# Altium footprint library Package_DFN_QFN.PcbLib: 735 footprints (part 2 of 46)
Each footprint in its own frame and in the unit in brackets; x right, y up, seen from the top. Pads: shape width x height; smd on the part's side, far side on the other; paste and mask are expansions set on the pad; w line width, h text height; cw(c..) or ccw(c..) is an arc to the next point about the centre after c.
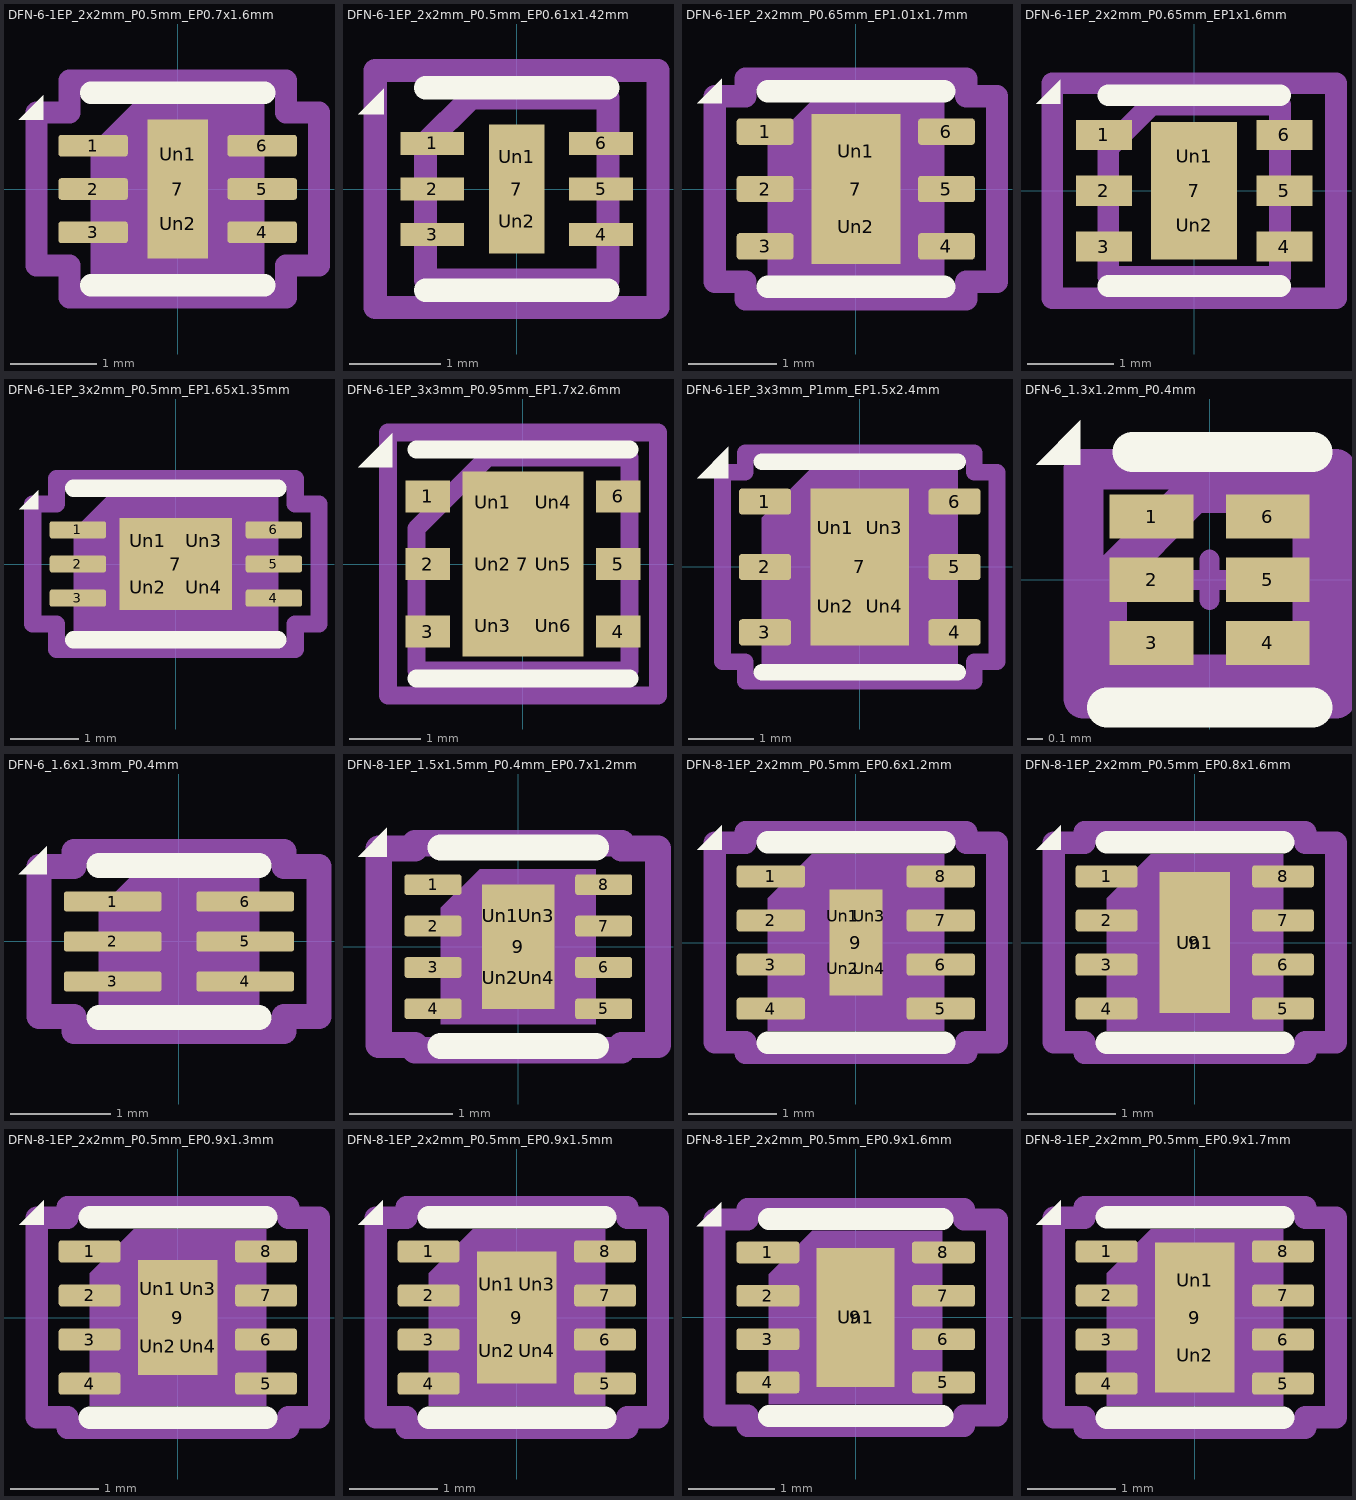
[diagram p1: the footprints below, top view; thin cyan lines are the x and y axes]

## DFN-6-1EP_2x2mm_P0.5mm_EP0.7x1.6mm [mm] "DFN-6-1EP_2x2mm_P0.5mm_EP0.7x1.6mm"
pads (9):
  rrect25% 0.8x0.25 smd: 1(-0.975,0.5) 2(-0.975,0) 3(-0.975,-0.5) 4(0.975,-0.5) 5(0.975,0) 6(0.975,0.5)
  rect 0.7x1.6 smd: 7(0,0)
  rrect25% 0.56x0.64 on Top Paste: Un1(0,0.4) Un2(0,-0.4)
F.SilkS:
  region: -1.55,0.8 -1.83,0.8 -1.55,1.08
  lines w0.254: -1,-1.11 1,-1.11 ; -1,1.11 1,1.11
Top Component Center:
  lines w0.127: -0.127,0 0.127,0 -0.127,0 ; 0,-0.127 0,0.127 0,-0.127
Top Assembly:
  region: 1,-1 -1,-1 -1,0.5 -0.5,1 1,1
Top Courtyard:
  lines w0.254: -1.63,-0.88 -1.63,0.88 -1.25,0.88 -1.25,1.25 1.25,1.25 1.25,0.88 1.63,0.88 1.63,-0.88 1.25,-0.88 1.25,-1.25 -1.25,-1.25 -1.25,-0.88 -1.63,-0.88
Top Designator:
  text ".Designator" at -2.251,-0.226 h1
3D body "DFN-6-1EP_2x2mm_P0.5mm_EP0.61x1.42mm.step": height 0.77, standoff 0, extent -1,-0.99 1,0.99

## DFN-6-1EP_2x2mm_P0.5mm_EP0.61x1.42mm [mm] "DFN-6-1EP_2x2mm_P0.5mm_EP0.61x1.42mm"
pads (9):
  rect 0.7x0.25 smd: 1(-0.925,0.5) 2(-0.925,0) 3(-0.925,-0.5) 4(0.925,-0.5) 5(0.925,0) 6(0.925,0.5)
  rect 0.61x1.42 smd: 7(0,0)
  rect 0.5x0.56 on Top Paste: Un1(0,0.355) Un2(0,-0.355)
F.SilkS:
  region: -1.46,0.82 -1.74,0.82 -1.46,1.1
  lines w0.254: -1,-1.11 1,-1.11 ; -1,1.11 1,1.11
Top Component Center:
  lines w0.127: -0.127,0 0.127,0 -0.127,0 ; 0,-0.127 0,0.127 0,-0.127
Top Assembly:
  lines w0.254: -1,-1 1,-1 1,1 -0.5,1 -1,0.5 -1,-1
Top Courtyard:
  lines w0.254: -1.55,-1.3 1.55,-1.3 1.55,1.3 -1.55,1.3 -1.55,-1.3
Top Designator:
  text ".Designator" at -2.251,-0.226 h1
3D body "DFN-6-1EP_2x2mm_P0.5mm_EP0.61x1.42mm.step": height 0.77, standoff 0, extent -1,-0.99 1,0.99

## DFN-6-1EP_2x2mm_P0.65mm_EP1.01x1.7mm [mm] "DFN-6-1EP_2x2mm_P0.65mm_EP1.01x1.7mm"
pads (9):
  rrect25% 0.645x0.3 smd: 1(-1.028,0.65) 2(-1.028,0) 3(-1.028,-0.65) 4(1.028,-0.65) 5(1.028,0) 6(1.028,0.65)
  rect 1.01x1.7 smd: 7(0,0)
  rrect25% 0.81x0.69 on Top Paste: Un1(0,0.425) Un2(0,-0.425)
F.SilkS:
  region: -1.52,0.97 -1.8,0.97 -1.52,1.25
  lines w0.254: -1,-1.11 1,-1.11 ; -1,1.11 1,1.11
Top Component Center:
  lines w0.127: -0.127,0 0.127,0 -0.127,0 ; 0,-0.127 0,0.127 0,-0.127
Top Assembly:
  region: 1,-1 -1,-1 -1,0.5 -0.5,1 1,1
Top Courtyard:
  lines w0.254: -1.6,-1.05 -1.6,1.05 -1.25,1.05 -1.25,1.25 1.25,1.25 1.25,1.05 1.6,1.05 1.6,-1.05 1.25,-1.05 1.25,-1.25 -1.25,-1.25 -1.25,-1.05 -1.6,-1.05
Top Designator:
  text ".Designator" at -2.251,-0.226 h1
3D body "DFN-6-1EP_2x2mm_P0.65mm_EP1x1.6mm.step": height 0.64, standoff 0, extent -1,-0.99 1,0.99

## DFN-6-1EP_2x2mm_P0.65mm_EP1x1.6mm [mm] "DFN-6-1EP_2x2mm_P0.65mm_EP1x1.6mm"
pads (9):
  rect 0.65x0.35 smd: 1(-1.05,0.65) 2(-1.05,0) 3(-1.05,-0.65) 4(1.05,-0.65) 5(1.05,0) 6(1.05,0.65)
  rect 1x1.6 smd: 7(0,0)
  rect 0.82x0.63 on Top Paste: Un1(0,0.4) Un2(0,-0.4)
F.SilkS:
  region: -1.56,1.01 -1.84,1.01 -1.56,1.29
  lines w0.254: -1,-1.11 1,-1.11 ; -1,1.11 1,1.11
Top Component Center:
  lines w0.127: -0.127,0 0.127,0 -0.127,0 ; 0,-0.127 0,0.127 0,-0.127
Top Assembly:
  lines w0.254: -1,-1 1,-1 1,1 -0.5,1 -1,0.5 -1,-1
Top Courtyard:
  lines w0.254: -1.65,-1.25 1.65,-1.25 1.65,1.25 -1.65,1.25 -1.65,-1.25
Top Designator:
  text ".Designator" at -2.251,-0.226 h1
3D body "DFN-6-1EP_2x2mm_P0.65mm_EP1x1.6mm.step": height 0.64, standoff 0, extent -1,-0.99 1,0.99

## DFN-6-1EP_3x2mm_P0.5mm_EP1.65x1.35mm [mm] "DFN-6-1EP_3x2mm_P0.5mm_EP1.65x1.35mm"
pads (11):
  rrect25% 0.825x0.25 smd: 1(-1.438,0.5) 2(-1.438,0) 3(-1.438,-0.5) 4(1.438,-0.5) 5(1.438,0) 6(1.438,0.5)
  rect 1.65x1.35 smd: 7(0,0)
  rrect25% 0.67x0.54 on Top Paste: Un1(-0.41,0.34) Un2(-0.41,-0.34) Un3(0.41,0.34) Un4(0.41,-0.34)
F.SilkS:
  region: -2.02,0.8 -2.3,0.8 -2.02,1.08
  lines w0.254: -1.5,-1.11 1.5,-1.11 ; -1.5,1.11 1.5,1.11
Top Component Center:
  lines w0.127: -0.127,0 0.127,0 -0.127,0 ; 0,-0.127 0,0.127 0,-0.127
Top Assembly:
  region: 1.5,-1 -1.5,-1 -1.5,0.5 -1,1 1.5,1
Top Courtyard:
  lines w0.254: -2.1,-0.88 -1.75,-0.88 -1.75,-1.25 1.75,-1.25 1.75,-0.88 2.1,-0.88 2.1,0.88 1.75,0.88 1.75,1.25 -1.75,1.25 -1.75,0.88 -2.1,0.88 -2.1,-0.88
Top Designator:
  text ".Designator" at -2.251,-0.226 h1
3D body "DFN-6-1EP_3x2mm_Pitch0.5mm.step": height 0.77, standoff 0, extent -1.5,-0.99 1.5,0.99

## DFN-6-1EP_3x3mm_P0.95mm_EP1.7x2.6mm [mm] "DFN-6-1EP_3x3mm_P0.95mm_EP1.7x2.6mm"
pads (13):
  rect 0.63x0.45 smd: 1(-1.34,0.95) 2(-1.34,0) 3(-1.34,-0.95) 4(1.34,-0.95) 5(1.34,0) 6(1.34,0.95)
  rect 1.7x2.6 smd: 7(0,0)
  rect 0.66x0.73 on Top Paste: Un1(-0.425,0.866) Un2(-0.425,0) Un3(-0.425,-0.866) Un4(0.425,0.866) Un5(0.425,0) Un6(0.425,-0.866)
F.SilkS:
  region: -1.84,1.36 -2.32,1.36 -1.84,1.84
  lines w0.254: -1.5,-1.61 1.5,-1.61 ; -1.5,1.61 1.5,1.61
Top Component Center:
  lines w0.127: -0.127,0 0.127,0 -0.127,0 ; 0,-0.127 0,0.127 0,-0.127
Top Assembly:
  lines w0.254: -1.5,-1.5 1.5,-1.5 1.5,1.5 -0.5,1.5 -1.5,0.5 -1.5,-1.5
Top Courtyard:
  lines w0.254: -1.9,-1.85 1.9,-1.85 1.9,1.85 -1.9,1.85 -1.9,-1.85
Top Designator:
  text ".Designator" at -2.251,-0.226 h1
3D body "DFN-6-1EP_3x3mm_P0.95mm_EP1.7x2.6mm.step": height 0.87, standoff 0, extent -1.5,-1.49 1.5,1.49
3D body "DFN-6-1EP_3x3mm_P0.95mm_EP1.7x2.6mm.step": height 0.87, standoff 0, extent -1.5,-1.49 1.5,1.49

## DFN-6-1EP_3x3mm_P1mm_EP1.5x2.4mm [mm] "DFN-6-1EP_3x3mm_P1mm_EP1.5x2.4mm"
pads (11):
  rrect25% 0.8x0.4 smd: 1(-1.45,1) 2(-1.45,0) 3(-1.45,-1) 4(1.45,-1) 5(1.45,0) 6(1.45,1)
  rect 1.5x2.4 smd: 7(0,0)
  rrect25% 0.6x0.97 on Top Paste: Un1(-0.375,0.6) Un2(-0.375,-0.6) Un3(0.375,0.6) Un4(0.375,-0.6)
F.SilkS:
  region: -2.01,1.36 -2.49,1.36 -2.01,1.84
  lines w0.254: -1.5,-1.61 1.5,-1.61 ; -1.5,1.61 1.5,1.61
Top Component Center:
  lines w0.127: -0.127,0 0.127,0 -0.127,0 ; 0,-0.127 0,0.127 0,-0.127
Top Assembly:
  region: 1.5,-1.5 -1.5,-1.5 -1.5,0.75 -0.75,1.5 1.5,1.5
Top Courtyard:
  lines w0.254: -2.1,-1.45 -2.1,1.45 -1.75,1.45 -1.75,1.75 1.75,1.75 1.75,1.45 2.1,1.45 2.1,-1.45 1.75,-1.45 1.75,-1.75 -1.75,-1.75 -1.75,-1.45 -2.1,-1.45
Top Designator:
  text ".Designator" at -3.43,-0.344 h1.52

## DFN-6_1.3x1.2mm_P0.4mm [mm] "DFN-6_1.3x1.2mm_P0.4mm"
pads (6):
  rect 0.53x0.28 smd: 1(-0.368,0.4) 2(-0.368,0) 3(-0.368,-0.4) 4(0.368,-0.4) 5(0.368,0) 6(0.368,0.4)
F.SilkS:
  region: -0.82,0.73 -1.1,0.73 -0.82,1.01
  lines w0.254: -0.65,-0.81 0.65,-0.81 ; -0.49,0.81 0.65,0.81
Top Component Center:
  lines w0.127: -0.127,0 0.127,0 -0.127,0 ; 0,-0.127 0,0.127 0,-0.127
Top Assembly:
  lines w0.254: -0.65,-0.6 0.65,-0.6 0.65,0.55 -0.1,0.55 -0.65,0 -0.65,-0.6
Top Courtyard:
  lines w0.254: -0.8,-0.75 0.8,-0.75 0.8,0.7 -0.8,0.7 -0.8,-0.75
Top Designator:
  text ".Designator" at -1.69,-0.17 h0.75

## DFN-6_1.6x1.3mm_P0.4mm [mm] "DFN-6_1.6x1.3mm_P0.4mm"
pads (6):
  rrect25% 0.975x0.2 smd: 1(-0.663,0.4) 2(-0.663,0) 3(-0.663,-0.4) 4(0.663,-0.4) 5(0.663,0) 6(0.663,0.4)
F.SilkS:
  region: -1.32,0.67 -1.6,0.67 -1.32,0.95
  lines w0.254: -0.8,-0.76 0.8,-0.76 ; -0.8,0.76 0.8,0.76
Top Component Center:
  lines w0.127: -0.127,0 0.127,0 -0.127,0 ; 0,-0.127 0,0.127 0,-0.127
Top Assembly:
  region: 0.8,-0.65 -0.8,-0.65 -0.8,0.325 -0.475,0.65 0.8,0.65
Top Courtyard:
  lines w0.254: -1.4,-0.75 -1.05,-0.75 -1.05,-0.9 1.05,-0.9 1.05,-0.75 1.4,-0.75 1.4,0.75 1.05,0.75 1.05,0.9 -1.05,0.9 -1.05,0.75 -1.4,0.75 -1.4,-0.75
Top Designator:
  text ".Designator" at -2.251,-0.226 h1

## DFN-8-1EP_1.5x1.5mm_P0.4mm_EP0.7x1.2mm [mm] "DFN-8-1EP_1.5x1.5mm_P0.4mm_EP0.7x1.2mm"
pads (13):
  rrect25% 0.55x0.2 smd: 1(-0.825,0.6) 2(-0.825,0.2) 3(-0.825,-0.2) 4(-0.825,-0.6) 5(0.825,-0.6) 6(0.825,-0.2) 7(0.825,0.2) 8(0.825,0.6)
  rect 0.7x1.2 smd: 9(0,0)
  rrect25% 0.28x0.48 on Top Paste: Un1(-0.175,0.3) Un2(-0.175,-0.3) Un3(0.175,0.3) Un4(0.175,-0.3)
F.SilkS:
  region: -1.27,0.87 -1.55,0.87 -1.27,1.15
  lines w0.254: -0.75,-0.96 0.75,-0.96 ; -0.75,0.96 0.75,0.96
Top Component Center:
  lines w0.127: -0.127,0 0.127,0 -0.127,0 ; 0,-0.127 0,0.127 0,-0.127
Top Assembly:
  region: 0.75,-0.75 -0.75,-0.75 -0.75,0.375 -0.375,0.75 0.75,0.75
Top Courtyard:
  lines w0.254: -1.35,-0.95 -1,-0.95 -1,-1 1,-1 1,-0.95 1.35,-0.95 1.35,0.95 1,0.95 1,1 -1,1 -1,0.95 -1.35,0.95 -1.35,-0.95
Top Designator:
  text ".Designator" at -1.69,-0.17 h0.75

## DFN-8-1EP_2x2mm_P0.5mm_EP0.6x1.2mm [mm] "DFN-8-1EP_2x2mm_P0.5mm_EP0.6x1.2mm"
pads (13):
  rrect25% 0.775x0.25 smd: 1(-0.962,0.75) 2(-0.962,0.25) 3(-0.962,-0.25) 4(-0.962,-0.75) 5(0.962,-0.75) 6(0.962,-0.25) 7(0.962,0.25) 8(0.962,0.75)
  rect 0.6x1.2 smd: 9(0,0)
  rrect25% 0.24x0.48 on Top Paste: Un1(-0.15,0.3) Un2(-0.15,-0.3) Un3(0.15,0.3) Un4(0.15,-0.3)
F.SilkS:
  region: -1.52,1.05 -1.8,1.05 -1.52,1.33
  lines w0.254: -1,-1.135 1,-1.135 ; -1,1.135 1,1.135
Top Component Center:
  lines w0.127: -0.127,0 0.127,0 -0.127,0 ; 0,-0.127 0,0.127 0,-0.127
Top Assembly:
  region: 1,-1 -1,-1 -1,0.5 -0.5,1 1,1
Top Courtyard:
  lines w0.254: -1.6,-1.13 -1.25,-1.13 -1.25,-1.25 1.25,-1.25 1.25,-1.13 1.6,-1.13 1.6,1.13 1.25,1.13 1.25,1.25 -1.25,1.25 -1.25,1.13 -1.6,1.13 -1.6,-1.13
Top Designator:
  text ".Designator" at -2.251,-0.226 h1
3D body "DFN-8-1EP_2x2mm_P0.5mm_EP0.6x1.2mm.step": height 0.92, standoff 0, extent -1,-0.99 1,0.99

## DFN-8-1EP_2x2mm_P0.5mm_EP0.8x1.6mm [mm] "DFN-8-1EP_2x2mm_P0.5mm_EP0.8x1.6mm"
pads (10):
  rrect25% 0.7x0.25 smd: 1(-1,0.75) 2(-1,0.25) 3(-1,-0.25) 4(-1,-0.75) 5(1,-0.75) 6(1,-0.25) 7(1,0.25) 8(1,0.75)
  rect 0.8x1.6 smd: 9(0,0)
  rrect25% 0.64x1.29 on Top Paste: Un1(0,0)
F.SilkS:
  region: -1.52,1.05 -1.8,1.05 -1.52,1.33
  lines w0.254: -1,-1.135 1,-1.135 ; -1,1.135 1,1.135
Top Component Center:
  lines w0.127: -0.127,0 0.127,0 -0.127,0 ; 0,-0.127 0,0.127 0,-0.127
Top Assembly:
  region: 1,-1 -1,-1 -1,0.5 -0.5,1 1,1
Top Courtyard:
  lines w0.254: -1.6,-1.13 -1.25,-1.13 -1.25,-1.25 1.25,-1.25 1.25,-1.13 1.6,-1.13 1.6,1.13 1.25,1.13 1.25,1.25 -1.25,1.25 -1.25,1.13 -1.6,1.13 -1.6,-1.13
Top Designator:
  text ".Designator" at -2.251,-0.226 h1
3D body "DFN-8-1EP_2x2mm_P0.5mm_EP0.6x1.2mm.step": height 0.92, standoff 0, extent -1,-0.99 1,0.99

## DFN-8-1EP_2x2mm_P0.5mm_EP0.9x1.3mm [mm] "DFN-8-1EP_2x2mm_P0.5mm_EP0.9x1.3mm"
pads (13):
  rrect25% 0.7x0.25 smd: 1(-1,0.75) 2(-1,0.25) 3(-1,-0.25) 4(-1,-0.75) 5(1,-0.75) 6(1,-0.25) 7(1,0.25) 8(1,0.75)
  rect 0.9x1.3 smd: 9(0,0)
  rrect25% 0.36x0.52 on Top Paste: Un1(-0.225,0.325) Un2(-0.225,-0.325) Un3(0.225,0.325) Un4(0.225,-0.325)
F.SilkS:
  region: -1.52,1.05 -1.8,1.05 -1.52,1.33
  lines w0.254: -1,-1.135 1,-1.135 ; -1,1.135 1,1.135
Top Component Center:
  lines w0.127: -0.127,0 0.127,0 -0.127,0 ; 0,-0.127 0,0.127 0,-0.127
Top Assembly:
  region: 1,-1 -1,-1 -1,0.5 -0.5,1 1,1
Top Courtyard:
  lines w0.254: -1.6,-1.13 -1.25,-1.13 -1.25,-1.25 1.25,-1.25 1.25,-1.13 1.6,-1.13 1.6,1.13 1.25,1.13 1.25,1.25 -1.25,1.25 -1.25,1.13 -1.6,1.13 -1.6,-1.13
Top Designator:
  text ".Designator" at -2.251,-0.226 h1
3D body "DFN-8-1EP_2x2mm_P0.5mm_EP0.6x1.2mm.step": height 0.92, standoff 0, extent -1,-0.99 1,0.99

## DFN-8-1EP_2x2mm_P0.5mm_EP0.9x1.5mm [mm] "DFN-8-1EP_2x2mm_P0.5mm_EP0.9x1.5mm"
pads (13):
  rrect25% 0.7x0.25 smd: 1(-1,0.75) 2(-1,0.25) 3(-1,-0.25) 4(-1,-0.75) 5(1,-0.75) 6(1,-0.25) 7(1,0.25) 8(1,0.75)
  rect 0.9x1.5 smd: 9(0,0)
  rrect25% 0.36x0.6 on Top Paste: Un1(-0.225,0.375) Un2(-0.225,-0.375) Un3(0.225,0.375) Un4(0.225,-0.375)
F.SilkS:
  region: -1.52,1.05 -1.8,1.05 -1.52,1.33
  lines w0.254: -1,-1.135 1,-1.135 ; -1,1.135 1,1.135
Top Component Center:
  lines w0.127: -0.127,0 0.127,0 -0.127,0 ; 0,-0.127 0,0.127 0,-0.127
Top Assembly:
  region: 1,-1 -1,-1 -1,0.5 -0.5,1 1,1
Top Courtyard:
  lines w0.254: -1.6,-1.13 -1.25,-1.13 -1.25,-1.25 1.25,-1.25 1.25,-1.13 1.6,-1.13 1.6,1.13 1.25,1.13 1.25,1.25 -1.25,1.25 -1.25,1.13 -1.6,1.13 -1.6,-1.13
Top Designator:
  text ".Designator" at -2.251,-0.226 h1
3D body "DFN-8-1EP_2x2mm_P0.5mm_EP0.6x1.2mm.step": height 0.92, standoff 0, extent -1,-0.99 1,0.99

## DFN-8-1EP_2x2mm_P0.5mm_EP0.9x1.6mm [mm] "DFN-8-1EP_2x2mm_P0.5mm_EP0.9x1.6mm"
pads (10):
  rrect25% 0.725x0.25 smd: 1(-1.012,0.75) 2(-1.012,0.25) 3(-1.012,-0.25) 4(-1.012,-0.75) 5(1.012,-0.75) 6(1.012,-0.25) 7(1.012,0.25) 8(1.012,0.75)
  rect 0.9x1.6 smd: 9(0,0)
  rrect25% 0.73x1.29 on Top Paste: Un1(0,0)
F.SilkS:
  region: -1.55,1.05 -1.83,1.05 -1.55,1.33
  lines w0.254: -1,-1.135 1,-1.135 ; -1,1.135 1,1.135
Top Component Center:
  lines w0.127: -0.127,0 0.127,0 -0.127,0 ; 0,-0.127 0,0.127 0,-0.127
Top Assembly:
  region: 1,-1 -1,-1 -1,0.5 -0.5,1 1,1
Top Courtyard:
  lines w0.254: -1.63,-1.13 -1.25,-1.13 -1.25,-1.25 1.25,-1.25 1.25,-1.13 1.63,-1.13 1.63,1.13 1.25,1.13 1.25,1.25 -1.25,1.25 -1.25,1.13 -1.63,1.13 -1.63,-1.13
Top Designator:
  text ".Designator" at -2.251,-0.226 h1
3D body "DFN-8-1EP_2x2mm_P0.5mm_EP0.6x1.2mm.step": height 0.92, standoff 0, extent -1,-0.99 1,0.99

## DFN-8-1EP_2x2mm_P0.5mm_EP0.9x1.7mm [mm] "DFN-8-1EP_2x2mm_P0.5mm_EP0.9x1.7mm"
pads (11):
  rrect25% 0.7x0.25 smd: 1(-1,0.75) 2(-1,0.25) 3(-1,-0.25) 4(-1,-0.75) 5(1,-0.75) 6(1,-0.25) 7(1,0.25) 8(1,0.75)
  rect 0.9x1.7 smd: 9(0,0)
  rrect25% 0.73x0.69 on Top Paste: Un1(0,0.425) Un2(0,-0.425)
F.SilkS:
  region: -1.52,1.05 -1.8,1.05 -1.52,1.33
  lines w0.254: -1,-1.135 1,-1.135 ; -1,1.135 1,1.135
Top Component Center:
  lines w0.127: -0.127,0 0.127,0 -0.127,0 ; 0,-0.127 0,0.127 0,-0.127
Top Assembly:
  region: 1,-1 -1,-1 -1,0.5 -0.5,1 1,1
Top Courtyard:
  lines w0.254: -1.6,-1.13 -1.6,1.13 -1.25,1.13 -1.25,1.25 1.25,1.25 1.25,1.13 1.6,1.13 1.6,-1.13 1.25,-1.13 1.25,-1.25 -1.25,-1.25 -1.25,-1.13 -1.6,-1.13
Top Designator:
  text ".Designator" at -2.251,-0.226 h1
3D body "DFN-8-1EP_2x2mm_P0.5mm_EP0.6x1.2mm.step": height 0.92, standoff 0, extent -1,-0.99 1,0.99